# Altium footprint library A3144EUA.PcbLib: 1 footprints
Each footprint in its own frame and in the unit in brackets; x right, y up, seen from the top. Pads: shape width x height; smd on the part's side, far side on the other; paste and mask are expansions set on the pad; w line width, h text height; cw(c..) or ccw(c..) is an arc to the next point about the centre after c.
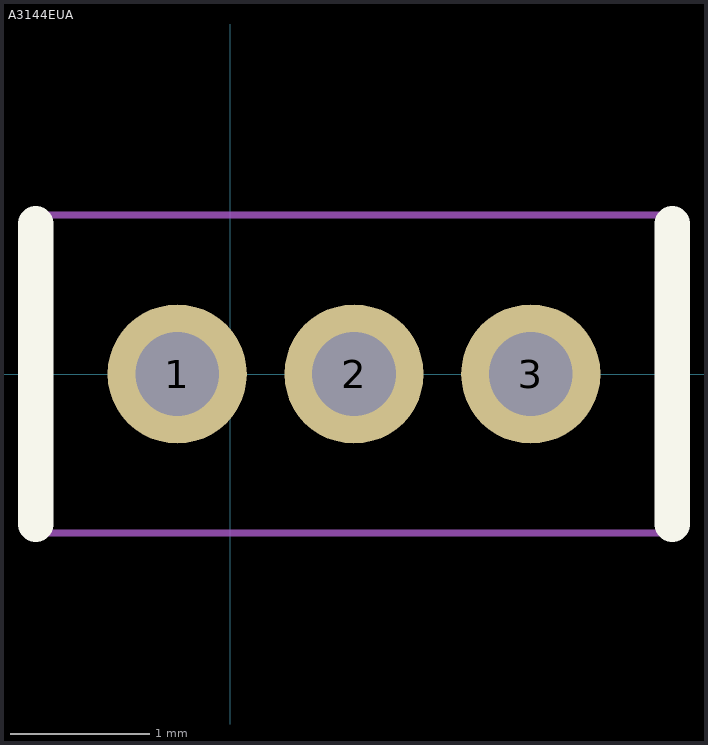
[diagram p0: the footprint, top view; thin cyan lines are the x and y axes]

## A3144EUA [mm] "Digital Switch Unipolar Switch Current Source Hall Effect 3-SIP"
pads (3):
  round 1 hole 0.6: 1(-0.381,0) 2(0.889,0) 3(2.159,0)
Top Overlay:
  lines w0.254: -1.397,-1.079 -1.397,1.079 ; 3.175,-1.079 3.175,1.079
Mechanical 1:
  lines w0.05: -1.397,-1.143 -1.397,1.143 3.175,1.143 3.175,-1.143 -1.397,-1.143